# EAGLE library part ESP32C3FH4X (library orb)
Espressif ESP32-C3FH4X, 4 MB in-package flash, QFN32 5 x 5 mm
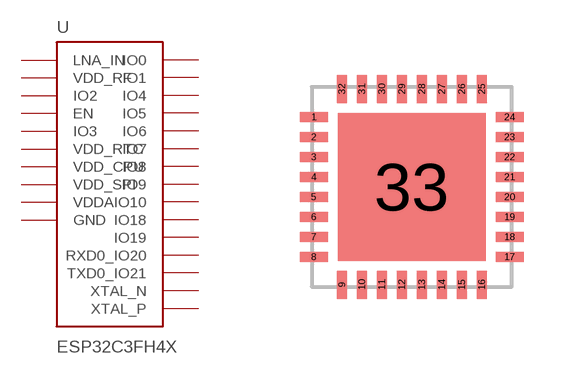
[diagram p0: symbol with the pads of ESP32C3_QFN32; footprint ESP32C3_QFN32]

Designator prefix U

## ESP32C3FH4X  [ESP32C3_QFN32]
1  LNA_IN  pas
2  VDD_RF  pas
3  VDD_RF  pas
4  IO0  pas
5  IO1  pas
6  IO2  pas
7  EN  pas
8  IO3  pas
9  IO4  pas
10  IO5  pas
11  VDD_RTC  pas
12  IO6  pas
13  IO7  pas
14  IO8  pas
15  IO9  pas
16  IO10  pas
17  VDD_CPU  pas
18  VDD_SPI  pas
25  IO18  pas
26  IO19  pas
27  RXD0_IO20  pas
28  TXD0_IO21  pas
29  XTAL_N  pas
30  XTAL_P  pas
31  VDDA  pas
32  VDDA  pas
33  GND  pas

## Footprint ESP32C3_QFN32 (pad centres in mm)
ESP32-C3FH4X QFN32: nominal prototype lands derived from 5x5 package drawing, 0.5 pitch, 3.7 exposed pad. Confirm against manufacturer DXF and stencil before release. Source: https://documentation.espressif.com/esp32-c3_datasheet_en.html
smd 0.7 x 0.25: 1 -2.45,1.75; 2 -2.45,1.25; 3 -2.45,0.75; 4 -2.45,0.25; 5 -2.45,-0.25; 6 -2.45,-0.75; 7 -2.45,-1.25; 8 -2.45,-1.75; 17 2.45,-1.75; 18 2.45,-1.25; 19 2.45,-0.75; 20 2.45,-0.25; 21 2.45,0.25; 22 2.45,0.75; 23 2.45,1.25; 24 2.45,1.75
smd 0.25 x 0.7: 9 -1.75,-2.45; 10 -1.25,-2.45; 11 -0.75,-2.45; 12 -0.25,-2.45; 13 0.25,-2.45; 14 0.75,-2.45; 15 1.25,-2.45; 16 1.75,-2.45; 25 1.75,2.45; 26 1.25,2.45; 27 0.75,2.45; 28 0.25,2.45; 29 -0.25,2.45; 30 -0.75,2.45; 31 -1.25,2.45; 32 -1.75,2.45
smd 3.7 x 3.7: 33 0,0